# Altium schematic symbol library 2020-05-11_08-08-27.SchLib: 2 symbols
Pins are listed as number, name and electrical type; pins without a type are passive.

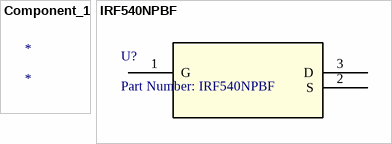
[diagram p0: symbols Component_1 to IRF540NPBF]

## Component_1
designator *

## IRF540NPBF
designator U?, comment Part Number: IRF540NPBF
No Description Available; Vendor: Infineon; Built_By: EMA_UL_Team; SourceLibrary: Infineon_2019-12-20; Manufacturer_Part_Number: IRF540NPBF; Copyright: Copyright (C) 2018 Accelerated Designs. All rights reserved; RefDes: RefDes; Type: DEV; Value: Value
footprint PG-TO220-3_INF
pins: 1 G, 2 S, 3 D